# EAGLE library part CON_JST_PH_10 (library dp_devices.v6)
JST PH series 2mm pitch 10 pins http://www.jst-mfg.com/product/pdf/eng/ePH.pdf 3mm from board edge to part's center
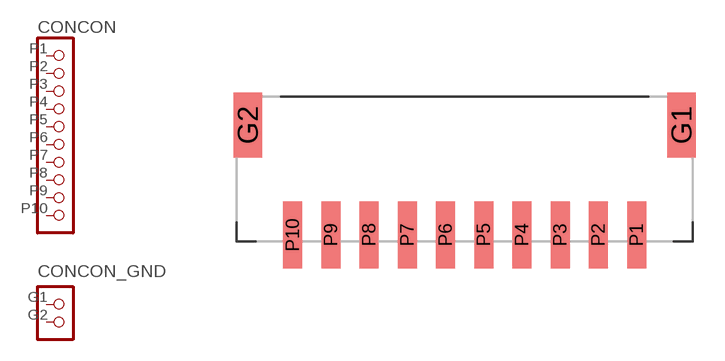
[diagram p173: symbol with the pads of CON_JST_PH_SMD_10; footprint CON_JST_PH_SMD_10]

Designator prefix CON; gates CON=HEADER1X10 CON_GND=HEADER1X2

## CON_JST_PH_10  [CON_JST_PH_SMD_10]
G1  CON_GND:1  pas
G2  CON_GND:2  pas
P1  CON:1  pas
P2  CON:2  pas
P3  CON:3  pas
P4  CON:4  pas
P5  CON:5  pas
P6  CON:6  pas
P7  CON:7  pas
P8  CON:8  pas
P9  CON:9  pas
P10  CON:10  pas

## Footprint CON_JST_PH_SMD_10 (pad centres in mm)
JST PH SMD 2mm Pitch
smd 1.5 x 3.4: G1 11.35,1.5; G2 -11.35,1.5
smd 1 x 3.5: P1 9,-4.25; P2 7,-4.25; P3 5,-4.25; P4 3,-4.25; P5 1,-4.25; P6 -1,-4.25; P7 -3,-4.25; P8 -5,-4.25; P9 -7,-4.25; P10 -9,-4.25